# Altium footprint library MCP6002-ISN.PcbLib: 3 footprints
Each footprint in its own frame and in the unit in brackets; x right, y up, seen from the top. Pads: shape width x height; smd on the part's side, far side on the other; paste and mask are expansions set on the pad; w line width, h text height; cw(c..) or ccw(c..) is an arc to the next point about the centre after c.
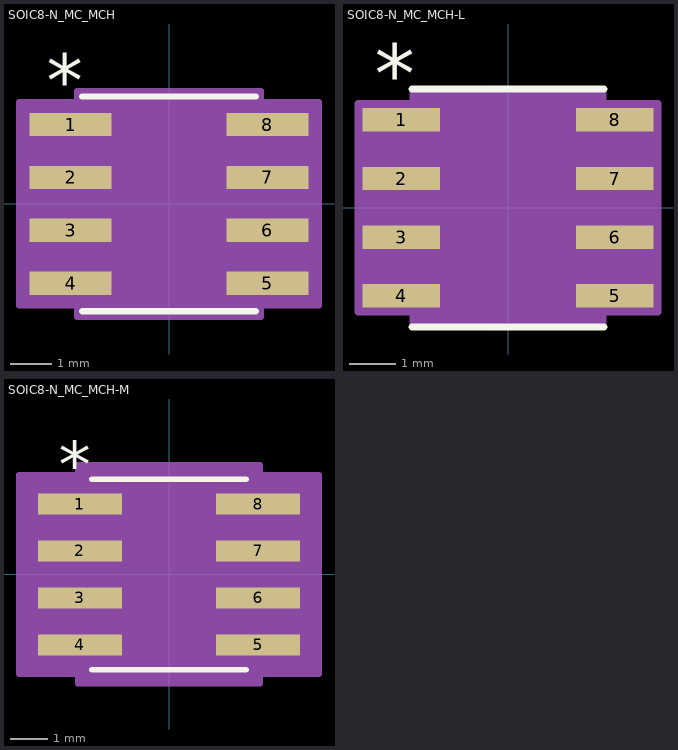
[diagram p0: the footprints below, top view; thin cyan lines are the x and y axes]

## SOIC8-N_MC_MCH [mil]
pads (8):
  rect 77.56x21.97 smd paste+0 mask+0: 1(-93,75) 2(-93,25) 3(-93,-25) 4(-93,-75) 5(93,-75) 6(93,-25) 7(93,25) 8(93,75)
Top Overlay:
  lines w6: -82,-101.5 82,-101.5 ; -82,101.5 82,101.5
  text ".Designator" at -137.5,-25 h50
  text "*" at -115.5,91.97 h50
Mechanical 13:
  lines w1: -12,96.5 ccw(c0,96.5) 12,96.5 ; -118,-85 -118,-65 -77,-65 -77,-85 -118,-85 ; -118,-35 -118,-15 -77,-15 -77,-35 -118,-35 ; -118,15 -118,35 -77,35 -77,15 -118,15 ; -118,65 -118,85 -77,85 -77,65 -118,65 ; -77,-96.5 77,-96.5 77,96.5 -77,96.5 -77,-96.5 ; 77,-85 77,-65 118,-65 118,-85 77,-85 ; 77,-35 77,-15 118,-15 118,-35 77,-35 ; 77,15 77,35 118,35 118,15 77,15 ; 77,65 77,85 118,85 118,65 77,65
  text "*" at -74.5,43.5 h50
  text ".Designator" at -137.5,-25 h50
Mechanical 15:
  region: -87,-95.98 -141.78,-95.98 -141.78,95.98 -87,95.98 -87,106.5 87,106.5 87,95.98 141.78,95.98 141.78,-95.98 87,-95.98 87,-106.5 -87,-106.5
  lines w6: -141.78,-95.98 -141.78,95.98 -87,95.98 -87,106.5 87,106.5 87,95.98 141.78,95.98 141.78,-95.98 87,-95.98 87,-106.5 -87,-106.5 -87,-95.98 -141.78,-95.98
3D body "SOIC8-N_MC_MCH.step": height 69.09, standoff 0, extent -117.99,-96.5 117.99,96.5

## SOIC8-N_MC_MCH-L [mil]
pads (8):
  rect 65.75x20 smd paste+0 mask+0: 1(-91.03,75) 2(-91.03,25) 3(-91.03,-25) 4(-91.03,-75) 5(91.03,-75) 6(91.03,-25) 7(91.03,25) 8(91.03,75)
Top Overlay:
  lines w6: -82,-101.5 82,-101.5 ; -82,101.5 82,101.5
  text ".Designator" at -137.5,-25 h50
  text "*" at -113.53,90 h50
Mechanical 13:
  lines w1: -12,96.5 ccw(c0,96.5) 12,96.5 ; -118,-85 -118,-65 -77,-65 -77,-85 -118,-85 ; -118,-35 -118,-15 -77,-15 -77,-35 -118,-35 ; -118,15 -118,35 -77,35 -77,15 -118,15 ; -118,65 -118,85 -77,85 -77,65 -118,65 ; -77,-96.5 77,-96.5 77,96.5 -77,96.5 -77,-96.5 ; 77,-85 77,-65 118,-65 118,-85 77,-85 ; 77,-35 77,-15 118,-15 118,-35 77,-35 ; 77,15 77,35 118,35 118,15 77,15 ; 77,65 77,85 118,85 118,65 77,65
  text "*" at -74.5,43.5 h50
  text ".Designator" at -137.5,-25 h50
Mechanical 15:
  region: -81,-89 -127.91,-89 -127.91,89 -81,89 -81,100.5 81,100.5 81,89 127.91,89 127.91,-89 81,-89 81,-100.5 -81,-100.5
  lines w6: -127.91,-89 -127.91,89 -81,89 -81,100.5 81,100.5 81,89 127.91,89 127.91,-89 81,-89 81,-100.5 -81,-100.5 -81,-89 -127.91,-89
3D body "SOIC8-N_MC_MCH.step": height 69.09, standoff 0, extent -117.99,-96.5 117.99,96.5

## SOIC8-N_MC_MCH-M [mm]
pads (8):
  rect 2.27x0.558 smd paste+0 mask+0: 1(-2.412,1.905) 2(-2.412,0.635) 3(-2.412,-0.635) 4(-2.412,-1.905) 5(2.412,-1.905) 6(2.412,-0.635) 7(2.412,0.635) 8(2.412,1.905)
Top Overlay:
  lines w0.152: -2.083,-2.578 2.083,-2.578 ; -2.083,2.578 2.083,2.578
  text ".Designator" at -3.492,-0.635 h1.27
  text "*" at -2.984,2.336 h1.27
Mechanical 13:
  lines w0.025: -0.305,2.451 ccw(c0,2.451) 0.305,2.451 ; -2.997,-2.159 -2.997,-1.651 -1.956,-1.651 -1.956,-2.159 -2.997,-2.159 ; -2.997,-0.889 -2.997,-0.381 -1.956,-0.381 -1.956,-0.889 -2.997,-0.889 ; -2.997,0.381 -2.997,0.889 -1.956,0.889 -1.956,0.381 -2.997,0.381 ; -2.997,1.651 -2.997,2.159 -1.956,2.159 -1.956,1.651 -2.997,1.651 ; -1.956,-2.451 1.956,-2.451 1.956,2.451 -1.956,2.451 -1.956,-2.451 ; 1.956,-2.159 1.956,-1.651 2.997,-1.651 2.997,-2.159 1.956,-2.159 ; 1.956,-0.889 1.956,-0.381 2.997,-0.381 2.997,-0.889 1.956,-0.889 ; 1.956,0.381 1.956,0.889 2.997,0.889 2.997,0.381 1.956,0.381 ; 1.956,1.651 1.956,2.159 2.997,2.159 2.997,1.651 1.956,1.651
  text "*" at -1.892,1.105 h1.27
  text ".Designator" at -3.492,-0.635 h1.27
Mechanical 15:
  region: -2.464,-2.692 -4.055,-2.692 -4.055,2.692 -2.464,2.692 -2.464,2.959 2.464,2.959 2.464,2.692 4.055,2.692 4.055,-2.692 2.464,-2.692 2.464,-2.959 -2.464,-2.959
  lines w0.152: -4.055,-2.692 -4.055,2.692 -2.464,2.692 -2.464,2.959 2.464,2.959 2.464,2.692 4.055,2.692 4.055,-2.692 2.464,-2.692 2.464,-2.959 -2.464,-2.959 -2.464,-2.692 -4.055,-2.692
3D body "SOIC8-N_MC_MCH.step": height 1.76, standoff 0, extent -2.997,-2.451 2.997,2.451